# Altium footprint library Amin-Library.PcbLib: 601 footprints (part 1 of 38)
Each footprint in its own frame and in the unit in brackets; x right, y up, seen from the top. Pads: shape width x height; smd on the part's side, far side on the other; paste and mask are expansions set on the pad; w line width, h text height; cw(c..) or ccw(c..) is an arc to the next point about the centre after c.
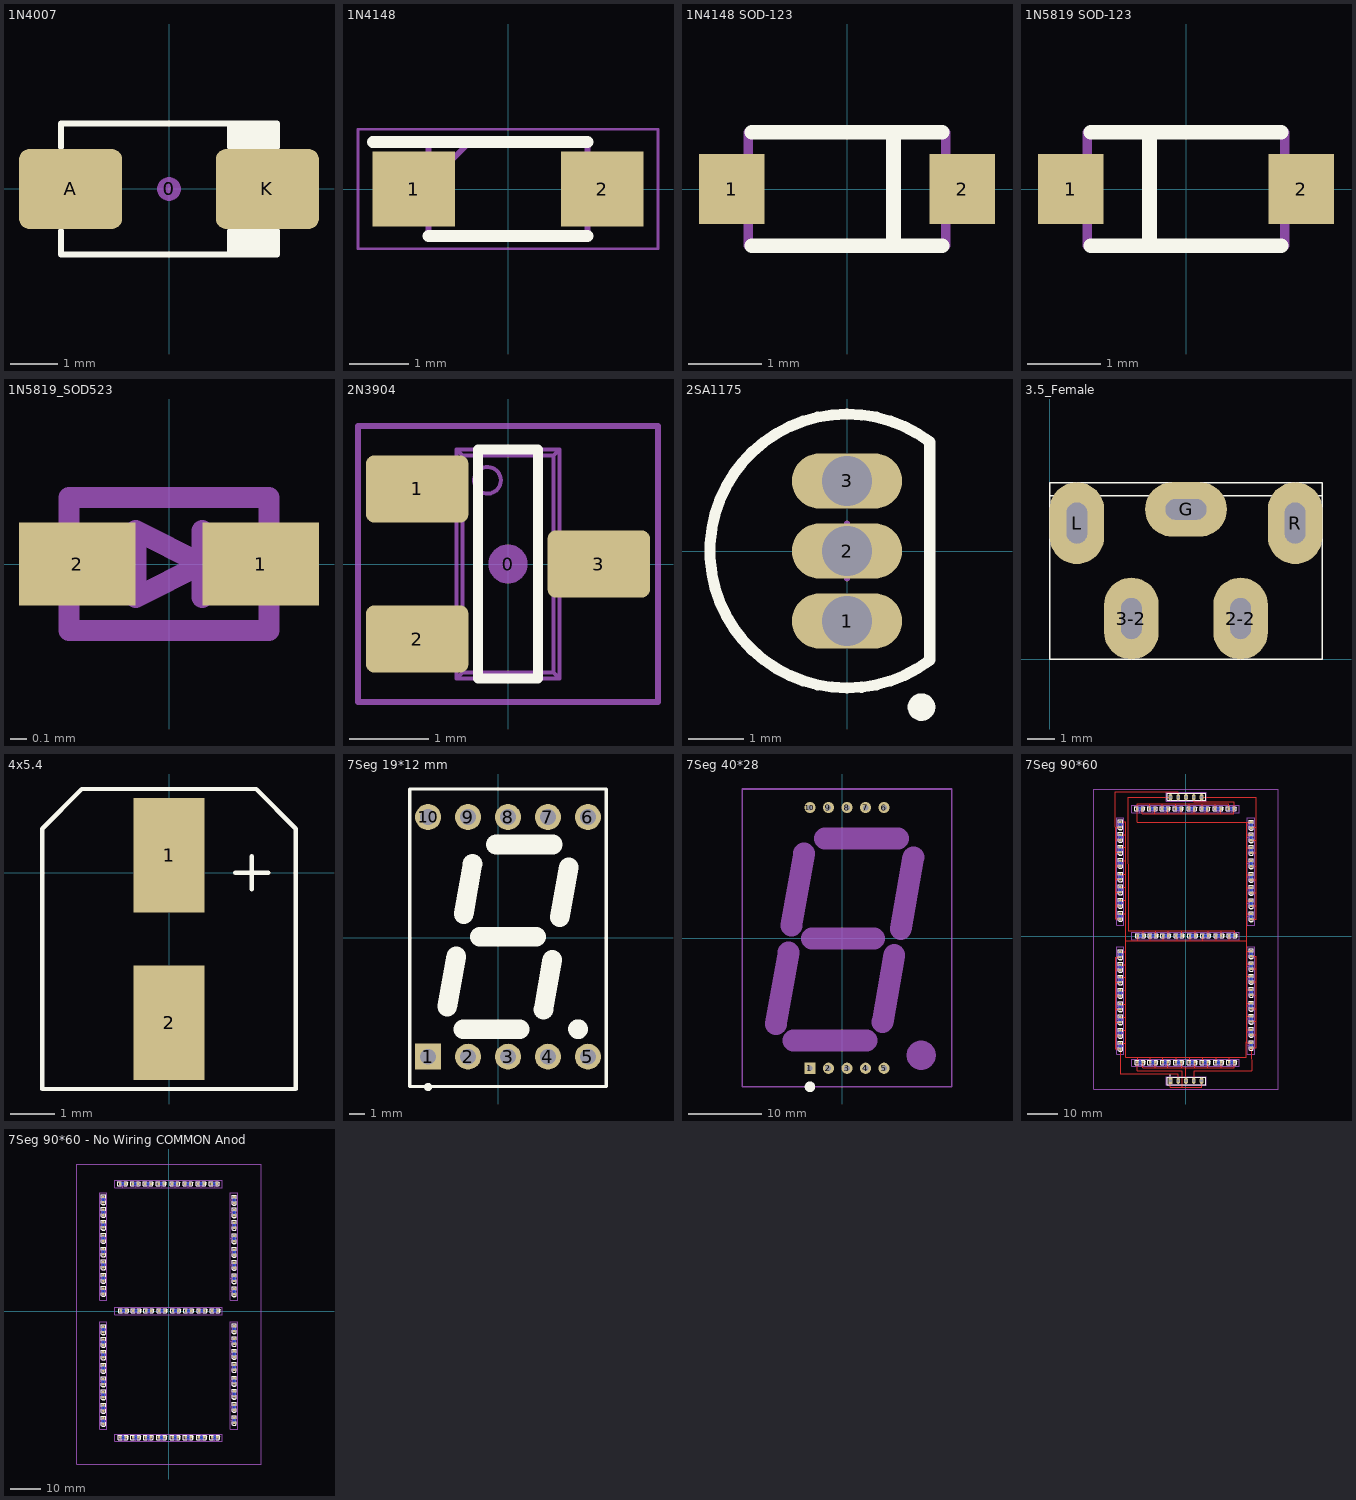
[diagram p0: the footprints below, top view; thin cyan lines are the x and y axes]

## 1N4007 [mm] "DO214 variation AC. SMA"
height 2.5
pads (3):
  round 0.508 on Mech15: 0(0,0)
  rrect25% 2.2x1.7 smd: A(-2.1,0) K(2.1,0)
Top Overlay:
  rectangle: 1.3,-1.4 2.3,-0.9
  rectangle: 1.3,0.9 2.3,1.4
  lines w0.127: -2.3,-0.9 -2.3,-1.4 2.3,-1.4 2.3,-0.9 1.3,-0.9 1.3,-1.4 ; -2.3,0.9 -2.3,1.4 2.3,1.4 2.3,0.9 1.3,0.9 ; 1.3,0.911 1.3,1.4
3D body "SW3dPS-DO-214AC SMA.STEP": height 2.42, standoff 0.02, extent -2.6,-1.3 2.6,1.3

## 1N4148 [mm]
pads (2):
  rect 1.4x1.27 smd: 1(-1.6,0) 2(1.6,0)
Top Overlay:
  lines w0.2: -2.3,0.8 1.35,0.8 ; -1.35,-0.8 1.35,-0.8
Mechanical 13:
  lines w0.1: -1.35,0.1 -0.65,0.8 ; -1.35,-0.8 1.35,-0.8 1.35,0.8 -1.35,0.8 -1.35,-0.8
Mechanical 15:
  lines w0.05: -2.55,-1.016 2.55,-1.016 2.55,1.016 -2.55,1.016 -2.55,-1.016
3D body "1n4148ws-7-f.stp": height 1.06, standoff -0.04, extent -1.25,-0.635 1.25,0.665

## 1N4148 SOD-123 [mm]
pads (2):
  rect 0.9x0.95 smd: 1(-1.575,0) 2(1.575,0)
Top Overlay:
  lines w0.203: -1.3,-0.775 0.635,-0.775 0.635,0.775 -1.3,0.775 ; -0.5,-0.775 1.3,-0.775 ; -0.5,0.775 1.3,0.775
Mechanical 13:
  lines w0.127: -1.35,-0.775 -1.35,0.775 1.35,0.775 1.35,-0.775 -1.35,-0.775
3D body "CircuitWorks-SOD123.step": height 1.28, standoff 0.01, extent -1.85,-0.8 1.85,0.8

## 1N5819 SOD-123 [mm]
pads (2):
  rect 0.9x0.95 smd: 1(-1.575,0) 2(1.575,0)
Top Overlay:
  lines w0.203: -1.3,-0.775 -0.5,-0.775 ; -1.3,0.775 -0.5,0.775 ; 1.3,-0.775 -0.5,-0.775 ; 1.3,0.775 -0.5,0.775 ; -0.5,-0.775 -0.5,0.775
Mechanical 13:
  lines w0.127: -1.35,-0.775 -1.35,0.775 1.35,0.775 1.35,-0.775 -1.35,-0.775
3D body "CircuitWorks-SOD123.step": height 1.28, standoff 0.01, extent -1.85,-0.8 1.85,0.8

## 1N5819_SOD523 [mm]
pads (2):
  rect 0.7x0.5 smd: 1(0.55,0) 2(-0.55,0)
Mechanical 13:
  region: -0.6,-0.15 -0.801,-0.15 -0.801,0.15 -0.6,0.15
  region: 0.8,-0.15 0.6,-0.15 0.6,0.15 0.8,0.15
  lines w0.127: 0.2,-0.2 0.2,0 ; 0.2,0.2 0.2,0 ; 0.2,0 -0.2,-0.2 -0.2,0.2 0.2,0 ; -0.6,-0.4 -0.6,0.4 0.6,0.4 0.6,-0.4 -0.6,-0.4
3D body "User Library-SOD-523F.step": height 0.71, standoff 0.01, extent -0.8,-0.399 0.8,0.399

## 2N3904 [mm] "BJT TRANSISTOR SOT23, 3 pin"
height 1.003
pads (4):
  round 0.5 on Mech15: 0(0,0)
  rrect25% 1.3x0.85 smd: 1(-1.15,0.95) 2(-1.15,-0.95) 3(1.15,0)
Top Overlay:
  lines w0.127: -0.381,-1.45 0.381,-1.45 0.381,1.45 -0.381,1.45 -0.381,-1.45
  text "." at -2.125,0.95 h1.4
Mechanical 13:
  circle w0.05: c-0.26,1.06 r0.169
  lines w0.05: -1.19,-1.19 -1.19,-0.71 ; -1.19,0.71 -1.19,1.19 ; -1.099,-1.19 -1.099,-0.71 ; -1.099,0.71 -1.099,1.19 ; -1.074,-1.19 -1.074,-0.71 ; -1.074,0.71 -1.074,1.19 ; -0.825,-1.19 -0.825,-0.71 ; -0.825,0.71 -0.825,1.19 ; -0.65,-1.19 -1.4,-1.19 -1.4,-0.71 -0.65,-0.71 ; -0.65,0.71 -1.4,0.71 -1.4,1.19 -0.65,1.19 ; 0.65,-0.24 1.4,-0.24 1.4,0.24 0.65,0.24 ; 0.825,-0.24 0.825,0.24 ; 1.074,-0.24 1.074,0.24 ; 1.099,-0.24 1.099,0.24 ; 1.19,-0.24 1.19,0.24 ; -0.65,-1.45 -0.576,-1.376 ; -0.65,-1.45 -0.65,1.45 ; -0.65,-1.45 0.65,-1.45 ; -0.65,1.45 0.65,1.45 ; -0.65,1.45 -0.576,1.376 ; -0.576,-1.376 -0.576,1.376 ; -0.576,-1.376 0.576,-1.376 ; -0.576,1.376 0.576,1.376 ; 0.576,-1.376 0.576,1.376 ; 0.576,-1.376 0.65,-1.45 ; 0.576,1.376 0.65,1.45 ; 0.65,-1.45 0.65,1.45
Mechanical 15:
  lines w0.076: -1.9,-1.75 1.9,-1.75 1.9,1.75 -1.9,1.75 -1.9,-1.75
3D body "SOT23-3.STEP": height 1.29, standoff -0.01, extent -1.4,-1.45 1.4,1.45

## 2SA1175 [mm] "TO, Flat Index; 3 In-Line, Axial Leads; Body Dia. 4.5mm; Leads 0.51 x 0.48 mm (max)"
height 6.86
pads (3):
  oval 2x1 hole 0.9: 1(0,-1.27) 2(0,0) 3(0,1.27)
Top Overlay:
  circle w0.25: c1.35,-2.83 r0.125
  lines w0.2: 1.5,-1.98 cw(c0,0) 1.5,1.98 1.5,-1.98
Mechanical 13:
  lines w0.1: 1.5,-1.98 cw(c0,0) 1.5,1.98 1.5,-1.98
Mechanical 15:
  lines w0.1: -0.5,0 0.5,0 ; 0,-0.5 0,0.5
3D body: height 6.86, standoff 2.2, extent -2.485,-2.495 1.501,2.495

## 3.5_Female [mm]
height 4.7
pads (5):
  oval 2x3 hole 0.762 slot 1.5 at 90 deg: 2-2(7,1.5) 3-2(3,1.5) L(1,5) R(9,5)
  oval 3x2 hole 0.762 slot 1.5 at 0 deg: G(5,5.5)
Top Overlay:
  lines w0.05: 0,5.969 0,6.477 10,6.477 10,6 ; 10,6 0,6 0,0 10,0 10,6
3D body: height 16, standoff 12, extent 2,0 8,6
3D body: height 12, standoff 0, extent 0,0 10.033,6.477

## 4x5.4 [mm]
pads (2):
  rect 1.6x2.6 smd: 1(0,0.4) 2(0,-3.4)
Top Overlay:
  lines w0.1: 1.5,0 2.25,0 ; 1.875,-0.375 1.875,0.375 ; -2.875,-4.9 -2.875,1 -1.975,1.9 1.975,1.9 2.875,1 2.875,-4.9 -2.875,-4.9
3D body "4x5.4.step": height 5.41, standoff -0.01, extent -2.65,-4.45 2.65,1.45

## 7Seg 19*12 mm [mm] "19*12 mm"
pads (10):
  rect 1.65x1.65 hole 1: 1(-4.472,-7.559)
  round 1.65 hole 1: 2(-1.932,-7.559) 3(0.608,-7.559) 4(3.148,-7.559) 5(5.688,-7.559) 6(5.688,7.681) 7(3.148,7.681) 8(0.608,7.681) 9(-1.932,7.681) 10(-4.472,7.681)
Top Overlay:
  circle w0.25: c-4.472,-9.49 r0.125
  circle w0.85: c5.063,-5.811 r0.2
  lines w0.2: -5.642,-9.461 -5.642,9.461 6.858,9.461 6.858,-9.461 -5.642,-9.461
  lines w1.25: -3.249,-4.366 -2.687,-1.191 ; -2.232,-5.814 1.364,-5.814 ; -2.21,1.509 -1.649,4.688 ; -1.194,0.061 2.41,0.061 ; -0.159,5.935 3.445,5.935 ; 2.868,-4.563 3.426,-1.389 ; 3.903,1.311 4.462,4.484
3D body "User Library-7-Segment.step": height 8, standoff -6.3, extent -5.692,-9.44 6.908,9.56

## 7Seg 40*28 [mil]
pads (10):
  rect 60x60 hole 30: 1(-175,-700)
  round 60 hole 30: 2(-75,-700) 3(25,-700) 4(125,-700) 5(225,-700) 6(225,706) 7(125,706) 8(25,706) 9(-75,706) 10(-175,706)
Top Overlay:
  circle w32.68: c-175,-800 r11.81
Mechanical 27:
  circle w78.74: c425,-630 r39.37
  lines w10: -539.96,-800 -539.96,806 589.96,806 589.96,-800 -539.96,-800
  lines w118.11: -358.6,-462.68 -290,-75 ; -275,70 -206.56,457.71 ; -263.7,-550 130,-550 ; -163.2,0 170,0 ; -93.7,540 300,540 ; 216.72,-449.96 280,-90 ; 315,50 383.29,437.73
3D body "7 segment 28.8 X 40.7.stp": height 358.27, standoff -222.44, extent -543.9,-800 589.96,802.36

## 7Seg 90*60 [mm]
pads (178):
  round 0.254 on Mech15: 0(-22.352,-35.814) 0(-22.352,-22.985) 0(-22.352,-18.542) 0(-22.352,-6) 0(-22.352,6.477) 0(-22.352,19.306) 0(-22.352,23.749) 0(-22.352,36.291) 0(-22.352,-10.104) 0(-22.352,32.187) 0(-22.352,-14.224) 0(-22.352,28.067) 0(-22.351,-27.209) 0(-22.351,15.082) 0(-22.351,-31.527) 0(-22.351,10.764) 0(-15.082,40.386) 0(-14.955,-42.164) 0(-14.828,-0.889) 0(-10.978,40.386) 0(-10.851,-42.164) 0(-10.724,-0.889) 0(-6.858,40.386) 0(-6.731,-42.164) 0(-6.604,-0.889) 0(-2.54,40.386) 0(-2.413,-42.164) 0(-2.286,-0.889) 0(1.903,40.386) 0(2.03,-42.164) 0(2.157,-0.889) 0(6.127,40.386) 0(6.254,-42.163) 0(6.381,-0.888) 0(10.445,40.387) 0(10.572,-42.163) 0(10.699,-0.888) 0(14.732,40.386) 0(14.859,-42.164) 0(14.986,-0.889) 0(20.193,-35.56) 0(20.193,-22.731) 0(20.193,-18.288) 0(20.193,-5.746) 0(20.193,6.35) 0(20.193,19.179) 0(20.193,23.622) 0(20.193,36.164) 0(20.193,-9.85) 0(20.193,32.06) 0(20.193,-13.97) 0(20.193,27.94) 0(20.194,-26.955) 0(20.194,14.955) 0(20.194,-31.273) 0(20.194,10.637)
  rect 1.24x2 hole 0.89: 1(-5.08,-47.117)
  rrect25% 0.8x0.8 smd: 2(-21.336,-36.664) 2(-21.336,-23.835) 2(-21.336,-19.392) 2(-21.336,-6.85) 2(-21.336,-10.954) 2(-21.336,-15.074) 2(-21.335,-28.059) 2(-21.335,-32.377) 3(-14.105,-41.148) 3(-10.001,-41.148) 3(-5.881,-41.148) 3(-1.563,-41.148) 3(2.88,-41.148) 3(7.104,-41.147) 3(11.422,-41.147) 3(15.709,-41.148) 4(21.209,-36.41) 4(21.209,-23.581) 4(21.209,-19.138) 4(21.209,-6.596) 4(21.209,-10.7) 4(21.209,-14.82) 4(21.21,-27.805) 4(21.21,-32.123) 5(-21.336,-34.964) 5(-21.336,-22.135) 5(-21.336,-17.692) 5(-21.336,-5.15) 5(-21.336,7.327) 5(-21.336,20.156) 5(-21.336,24.599) 5(-21.336,37.141) 5(-21.336,-9.254) 5(-21.336,33.037) 5(-21.336,-13.374) 5(-21.336,28.917) 5(-21.335,-26.359) 5(-21.335,15.932) 5(-21.335,-30.677) 5(-21.335,11.614) 5(-15.932,41.402) 5(-15.805,-41.148) 5(-15.678,0.127) 5(-11.828,41.402) 5(-11.701,-41.148) 5(-11.574,0.127) 5(-7.708,41.402) 5(-7.581,-41.148) 5(-7.454,0.127) 5(-3.39,41.402) 5(-3.263,-41.148) 5(-3.136,0.127) 5(1.053,41.402) 5(1.18,-41.148) 5(1.307,0.127) 5(5.277,41.402) 5(5.404,-41.147) 5(5.531,0.128) 5(9.595,41.403) 5(9.722,-41.147) 5(9.849,0.128) 5(13.882,41.402) 5(14.009,-41.148) 5(14.136,0.127) 5(21.209,-34.71) 5(21.209,-21.881) 5(21.209,-17.438) 5(21.209,-4.896) 5(21.209,7.2) 5(21.209,20.029) 5(21.209,24.472) 5(21.209,37.014) 5(21.209,-9) 5(21.209,32.91) 5(21.209,-13.12) 5(21.209,28.79) 5(21.21,-26.105) 5(21.21,15.805) 5(21.21,-30.423) 5(21.21,11.487) 6(21.209,5.5) 6(21.209,18.329) 6(21.209,22.772) 6(21.209,35.314) 6(21.209,31.21) 6(21.209,27.09) 6(21.21,14.105) 6(21.21,9.787) 7(-14.232,41.402) 7(-10.128,41.402) 7(-6.008,41.402) 7(-1.69,41.402) 7(2.753,41.402) 7(6.977,41.402) 7(11.295,41.403) 7(15.582,41.402) 9(-21.336,5.627) 9(-21.336,18.456) 9(-21.336,22.899) 9(-21.336,35.441) 9(-21.336,31.337) 9(-21.336,27.217) 9(-21.335,14.232) 9(-21.335,9.914) 10(-13.978,0.127) 10(-9.874,0.127) 10(-5.754,0.127) 10(-1.436,0.127) 10(3.007,0.127) 10(7.231,0.128) 10(11.549,0.128) 10(15.836,0.127)
  oval 1.24x2 hole 0.89: 2(-2.54,-47.117) 3(0,-47.117) 4(2.54,-47.117) 5(5.08,-47.117) 6(5.08,45.212) 7(2.54,45.212) 8(0,45.212) 9(-2.54,45.212) 10(-5.08,45.212)
Top Layer:
  lines w0.254: -22.987,-32.377 -21.336,-32.377 ; -22.987,-28.059 -21.336,-28.059 ; -22.987,-23.835 -21.336,-23.835 ; -22.987,-19.442 -21.336,-19.392 ; -22.987,-15.074 -21.336,-15.074 ; -22.987,-10.954 -21.336,-10.954 ; -22.987,9.914 -21.336,9.914 ; -22.987,14.232 -21.336,14.232 ; -22.987,18.456 -21.336,18.456 ; -22.987,22.849 -21.336,22.899 ; -22.987,27.217 -21.336,27.217 ; -22.987,31.337 -21.336,31.337 ; -21.336,-36.664 -22.987,-36.664 -22.987,-6.85 -21.336,-6.85 ; -21.336,-36.614 -21.335,-44.831 -2.54,-44.831 -2.54,-47.117 ; -21.336,-34.964 -19.685,-34.964 ; -21.335,-26.359 -19.685,-26.359 ; -21.336,-22.135 -19.685,-22.135 ; -21.336,-17.692 -19.685,-17.742 ; -21.336,-13.374 -19.685,-13.374 ; -21.336,-9.254 -19.685,-9.254 ; -21.336,5.627 -22.987,5.627 -22.987,35.441 ; -21.336,7.327 -19.685,7.327 ; -21.335,15.932 -19.685,15.932 ; -21.336,20.156 -19.685,20.156 ; -21.336,24.599 -19.685,24.549 ; -21.336,28.917 -19.685,28.917 ; -21.336,33.037 -19.685,33.037 ; -21.336,35.441 -22.987,35.441 ; -21.336,37.141 -19.685,37.141 -19.685,7.327 ; -21.335,-30.677 -19.685,-30.677 ; -21.335,11.614 -19.685,11.614 ; -21.025,-5.15 -21.336,-5.15 -19.685,-5.15 -19.685,-34.964 ; -19.685,-5.401 -19.685,7.327 ; -19.685,-1.524 -15.678,-1.524 ; -15.932,37.014 -15.932,41.402 -15.932,43.053 13.882,43.053 13.882,41.402 ; -15.882,37.014 19.558,37.014 ; -15.805,-41.148 -15.805,-43.815 -1.27,-43.815 -1.27,-49.276 ; -15.755,-41.148 -15.755,-39.497 ; -15.678,0.127 -15.678,-1.524 ; -14.232,41.402 -14.232,39.751 15.582,39.751 15.582,41.402 ; -14.105,-41.148 -14.105,-42.799 15.709,-42.799 15.709,-41.148 ; -13.978,0.127 -13.978,1.778 ; -11.828,41.402 -11.828,43.053 ; -11.651,-41.148 -11.651,-39.497 ; -11.574,-1.524 -11.574,0.127 ; -10.128,39.751 -10.128,41.402 ; -10.001,-42.799 -10.001,-41.148 ; -9.874,0.127 -9.874,1.778 ; -7.708,41.402 -7.708,43.053 ; -7.531,-41.148 -7.531,-39.497 ; -7.454,-1.524 -7.454,0.127 ; -6.008,39.751 -6.008,41.402 ; -5.881,-42.799 -5.881,-41.148 ; -5.754,0.127 -5.754,1.778 ; -5.08,-47.117 -5.107,-49.276 -1.513,-49.276 5.08,-49.276 5.08,-47.117 ; -5.08,45.212 -18.923,45.212 -18.796,1.778 -13.978,1.778 ; -3.39,41.402 -3.34,43.053 ; -3.213,-41.148 -3.163,-39.497 ; -3.136,0.127 -3.086,-1.524 ; -2.54,45.212 -2.54,46.99 -22.987,46.99 -22.987,35.441 ; -1.69,41.402 -1.64,39.751 ; -1.563,-41.148 -1.513,-42.799 ; -1.436,0.127 -1.386,1.778 ; 0,-47.117 0,-42.799 ; 1.053,41.402 1.053,43.053 ; 1.23,-41.148 1.23,-39.497 ; 1.307,-1.524 1.307,0.127 ; 2.54,-47.117 2.48,-43.815 21.336,-43.815 21.209,-36.41 22.86,-36.41 22.86,-6.596 21.209,-6.596 ; 2.54,45.212 2.54,43.688 15.532,43.688 15.532,41.402 ; 2.753,39.751 2.753,41.402 ; 2.88,-42.799 2.88,-41.148 ; 3.007,0.127 3.007,1.778 ; 5.08,45.212 22.86,45.212 22.86,35.364 ; 5.277,41.402 5.277,43.053 ; 5.454,-41.148 5.454,-39.497 ; 5.531,-1.524 5.531,0.127 ; 6.977,39.751 6.977,41.402 ; 7.104,-42.799 7.104,-41.148 ; 7.231,0.128 7.231,1.778 ; 9.595,41.403 9.595,43.053 ; 9.772,-41.147 9.772,-39.497 ; 9.849,-1.524 9.849,0.127 ; 11.295,39.751 11.295,41.401 ; 11.422,-42.799 11.422,-41.148 ; 11.549,0.128 11.549,1.778 ; 13.309,-39.497 19.558,-39.497 19.558,-34.417 ; 14.059,-41.148 14.059,-39.497 -15.755,-39.497 ; 14.136,0.127 14.136,-1.524 ; 15.836,0.127 15.836,1.778 -13.978,1.778 ; 19.558,-30.423 21.209,-30.423 ; 19.558,-26.105 21.209,-26.105 ; 19.558,-21.881 21.209,-21.881 ; 19.558,-17.488 21.209,-17.438 ; 19.558,-13.12 21.209,-13.12 ; 19.558,-9 21.209,-9 ; 19.558,-5.246 19.558,7.493 ; 19.558,-1.524 14.136,-1.524 ; 19.558,11.487 21.209,11.487 ; 19.558,15.805 21.209,15.805 ; 19.558,20.029 21.209,20.029 ; 19.558,24.422 21.209,24.472 ; 19.558,28.79 21.209,28.79 ; 19.558,32.91 21.209,32.91 ; 21.209,-34.71 19.558,-34.71 19.558,-4.896 21.209,-4.896 ; 21.21,-27.805 22.86,-27.805 ; 21.209,-23.581 22.86,-23.581 ; 21.209,-19.138 22.86,-19.188 ; 21.209,-14.82 22.86,-14.82 ; 21.209,-10.7 22.86,-10.7 ; 21.209,5.55 22.86,5.55 22.86,35.364 ; 21.209,7.2 19.558,7.2 19.558,37.014 ; 21.21,14.155 22.86,14.155 ; 21.209,18.379 22.86,18.379 ; 21.209,22.822 22.86,22.772 ; 21.209,27.14 22.86,27.14 ; 21.209,31.26 22.86,31.26 ; 21.209,35.364 22.86,35.364 ; 21.209,37.014 19.558,37.014 ; 21.21,-32.123 22.86,-32.123 ; 21.21,9.837 22.86,9.837 ; -19.685,-34.964 -19.685,-39.497 -15.755,-39.497 ; -15.678,-1.524 14.136,-1.524
Bottom Layer:
  pour cut-out: -15.582,40.902 -14.582,40.902 -14.582,41.902 -15.582,41.902
  pour cut-out: -11.478,40.902 -10.478,40.902 -10.478,41.902 -11.478,41.902
  pour cut-out: -7.358,40.902 -6.358,40.902 -6.358,41.902 -7.358,41.902
  pour cut-out: -3.04,40.902 -2.04,40.902 -2.04,41.902 -3.04,41.902
  pour cut-out: 1.403,40.902 2.403,40.902 2.403,41.902 1.403,41.902
  pour cut-out: 5.627,40.902 6.627,40.902 6.627,41.902 5.627,41.902
  pour cut-out: 9.945,40.903 10.945,40.903 10.945,41.903 9.945,41.903
  pour cut-out: 14.232,40.902 15.232,40.902 15.232,41.902 14.232,41.902
  pour cut-out: -21.836,36.791 -21.836,35.791 -20.836,35.791 -20.836,36.791
  pour cut-out: -21.836,32.687 -21.836,31.687 -20.836,31.687 -20.836,32.687
  pour cut-out: -21.836,28.567 -21.836,27.567 -20.836,27.567 -20.836,28.567
  pour cut-out: -21.836,24.249 -21.836,23.249 -20.836,23.249 -20.836,24.249
  pour cut-out: -21.836,19.806 -21.836,18.806 -20.836,18.806 -20.836,19.806
  pour cut-out: -21.835,15.582 -21.835,14.582 -20.835,14.582 -20.835,15.582
  pour cut-out: -21.835,11.264 -21.835,10.264 -20.835,10.264 -20.835,11.264
  pour cut-out: -21.836,6.977 -21.836,5.977 -20.836,5.977 -20.836,6.977
  pour cut-out: 20.709,36.664 20.709,35.664 21.709,35.664 21.709,36.664
  pour cut-out: 20.709,32.56 20.709,31.56 21.709,31.56 21.709,32.56
  pour cut-out: 20.709,28.44 20.709,27.44 21.709,27.44 21.709,28.44
  pour cut-out: 20.709,24.122 20.709,23.122 21.709,23.122 21.709,24.122
  pour cut-out: 20.709,19.679 20.709,18.679 21.709,18.679 21.709,19.679
  pour cut-out: 20.71,15.455 20.71,14.455 21.71,14.455 21.71,15.455
  pour cut-out: 20.71,11.137 20.71,10.137 21.71,10.137 21.71,11.137
  pour cut-out: 20.709,6.85 20.709,5.85 21.709,5.85 21.709,6.85
  pour cut-out: -15.328,-0.373 -14.328,-0.373 -14.328,0.627 -15.328,0.627
  pour cut-out: -11.224,-0.373 -10.224,-0.373 -10.224,0.627 -11.224,0.627
  pour cut-out: -7.104,-0.373 -6.104,-0.373 -6.104,0.627 -7.104,0.627
  pour cut-out: -2.786,-0.373 -1.786,-0.373 -1.786,0.627 -2.786,0.627
  pour cut-out: 1.657,-0.373 2.657,-0.373 2.657,0.627 1.657,0.627
  pour cut-out: 5.881,-0.372 6.881,-0.372 6.881,0.628 5.881,0.628
  pour cut-out: 10.199,-0.372 11.199,-0.372 11.199,0.628 10.199,0.628
  pour cut-out: 14.486,-0.373 15.486,-0.373 15.486,0.627 14.486,0.627
  pour cut-out: 20.709,-5.246 20.709,-6.246 21.709,-6.246 21.709,-5.246
  pour cut-out: 20.709,-9.35 20.709,-10.35 21.709,-10.35 21.709,-9.35
  pour cut-out: 20.709,-13.47 20.709,-14.47 21.709,-14.47 21.709,-13.47
  pour cut-out: 20.709,-17.788 20.709,-18.788 21.709,-18.788 21.709,-17.788
  pour cut-out: 20.709,-22.231 20.709,-23.231 21.709,-23.231 21.709,-22.231
  pour cut-out: 20.71,-26.455 20.71,-27.455 21.71,-27.455 21.71,-26.455
  pour cut-out: 20.71,-30.773 20.71,-31.773 21.71,-31.773 21.71,-30.773
  pour cut-out: 20.709,-35.06 20.709,-36.06 21.709,-36.06 21.709,-35.06
  pour cut-out: -21.836,-5.5 -21.836,-6.5 -20.836,-6.5 -20.836,-5.5
  pour cut-out: -21.836,-9.604 -21.836,-10.604 -20.836,-10.604 -20.836,-9.604
  pour cut-out: -21.836,-13.724 -21.836,-14.724 -20.836,-14.724 -20.836,-13.724
  pour cut-out: -21.836,-18.042 -21.836,-19.042 -20.836,-19.042 -20.836,-18.042
  pour cut-out: -21.836,-22.485 -21.836,-23.485 -20.836,-23.485 -20.836,-22.485
  pour cut-out: -21.835,-26.709 -21.835,-27.709 -20.835,-27.709 -20.835,-26.709
  pour cut-out: -21.835,-31.027 -21.835,-32.027 -20.835,-32.027 -20.835,-31.027
  pour cut-out: -21.836,-35.314 -21.836,-36.314 -20.836,-36.314 -20.836,-35.314
  pour cut-out: -15.455,-41.648 -14.455,-41.648 -14.455,-40.648 -15.455,-40.648
  pour cut-out: -11.351,-41.648 -10.351,-41.648 -10.351,-40.648 -11.351,-40.648
  pour cut-out: -7.231,-41.648 -6.231,-41.648 -6.231,-40.648 -7.231,-40.648
  pour cut-out: -2.913,-41.648 -1.913,-41.648 -1.913,-40.648 -2.913,-40.648
  pour cut-out: 1.53,-41.648 2.53,-41.648 2.53,-40.648 1.53,-40.648
  pour cut-out: 5.754,-41.647 6.754,-41.647 6.754,-40.647 5.754,-40.647
  pour cut-out: 10.072,-41.647 11.072,-41.647 11.072,-40.647 10.072,-40.647
  pour cut-out: 14.359,-41.648 15.359,-41.648 15.359,-40.648 14.359,-40.648
Top Overlay:
  drawing of 625 lines, arcs and shapes, not listed
Mechanical 1:
  lines w0.4: -22.601,-38.43 -20.201,-38.43 -20.201,-3.43 -22.601,-3.43 -22.601,-38.43 ; -22.601,3.57 -20.201,3.57 -20.201,38.57 -22.601,38.57 -22.601,3.57 ; -17.601,-42.43 17.399,-42.43 17.399,-40.03 -17.601,-40.03 -17.601,-42.43 ; -17.601,-1.13 17.399,-1.13 17.399,1.27 -17.601,1.27 -17.601,-1.13 ; -17.601,40.17 17.399,40.17 17.399,42.57 -17.601,42.57 -17.601,40.17 ; 19.999,-38.43 19.999,-3.43 22.399,-3.43 22.399,-38.43 19.999,-38.43 ; 19.999,3.57 22.399,3.57 22.399,38.57 19.999,38.57 19.999,3.57
Mechanical 4:
  circle w0.2: c-5.207,-45.376 r0.1
  circle w0.2: c-5.207,-45.376 r0.1
  lines w0.127: -6.15,-48.324 -6.15,-45.984 ; -6.15,-48.324 6.35,-48.324 ; -6.15,-48.324 6.35,-48.324 ; -6.15,-48.324 -6.15,-45.984 ; -6.15,-48.324 6.35,-48.324 ; -6.15,-48.324 6.35,-48.324 ; -6.15,-45.984 6.35,-45.984 ; -6.15,-45.984 6.35,-45.984 ; -6.15,44.206 -6.15,46.546 ; -6.15,44.206 6.35,44.206 ; -6.15,44.206 6.35,44.206 ; -6.15,44.206 -6.15,46.546 ; -6.15,44.206 6.35,44.206 ; -6.15,44.206 6.35,44.206 ; -6.15,46.546 6.35,46.546 ; -6.15,46.546 6.35,46.546 ; 6.35,-48.324 6.35,-45.984 ; 6.35,-48.324 6.35,-45.984 ; 6.35,44.206 6.35,46.546 ; 6.35,44.206 6.35,46.546
Mechanical 13:
  drawing of 896 lines, arcs and shapes, not listed
Mechanical 15:
  drawing of 224 lines, arcs and shapes, not listed
Mechanical 16:
  lines w0.05: -6.4,-48.574 6.604,-48.574 6.604,-45.734 -6.4,-45.734 -6.4,-48.574 ; -6.4,43.956 6.604,43.956 6.604,46.796 -6.4,46.796 -6.4,43.956
Mechanical 27:
  lines w0.254: -30,-49.784 30,-49.784 30,47.879 -30,47.879 -30,-49.784
3D body "LED 0603 APT1608 BLUE.STEP": height 0.75, standoff 0, extent -15.882,41.002 -14.282,41.802
3D body "LED 0603 APT1608 BLUE.STEP": height 0.75, standoff 0, extent -11.778,41.002 -10.178,41.802
3D body "LED 0603 APT1608 BLUE.STEP": height 0.75, standoff 0, extent -7.658,41.002 -6.058,41.802
3D body "LED 0603 APT1608 BLUE.STEP": height 0.75, standoff 0, extent -3.34,41.002 -1.74,41.802
3D body "LED 0603 APT1608 BLUE.STEP": height 0.75, standoff 0, extent 1.103,41.002 2.703,41.802
3D body "LED 0603 APT1608 BLUE.STEP": height 0.75, standoff 0, extent 5.327,41.002 6.927,41.802
3D body "LED 0603 APT1608 BLUE.STEP": height 0.75, standoff 0, extent 9.645,41.003 11.245,41.803
3D body "LED 0603 APT1608 BLUE.STEP": height 0.75, standoff 0, extent 13.932,41.002 15.532,41.802
3D body "LED 0603 APT1608 BLUE.STEP": height 0.75, standoff 0, extent -21.736,35.491 -20.936,37.091
3D body "LED 0603 APT1608 BLUE.STEP": height 0.75, standoff 0, extent -21.736,31.387 -20.936,32.987
3D body "LED 0603 APT1608 BLUE.STEP": height 0.75, standoff 0, extent -21.736,27.267 -20.936,28.867
3D body "LED 0603 APT1608 BLUE.STEP": height 0.75, standoff 0, extent -21.736,22.949 -20.936,24.549
3D body "LED 0603 APT1608 BLUE.STEP": height 0.75, standoff 0, extent -21.736,18.506 -20.936,20.106
3D body "LED 0603 APT1608 BLUE.STEP": height 0.75, standoff 0, extent -21.736,14.282 -20.936,15.882
3D body "LED 0603 APT1608 BLUE.STEP": height 0.75, standoff 0, extent -21.735,9.964 -20.935,11.564
3D body "LED 0603 APT1608 BLUE.STEP": height 0.75, standoff 0, extent -21.736,5.677 -20.936,7.277
3D body "LED 0603 APT1608 BLUE.STEP": height 0.75, standoff 0, extent 20.809,35.364 21.609,36.964
3D body "LED 0603 APT1608 BLUE.STEP": height 0.75, standoff 0, extent 20.809,31.26 21.609,32.86
3D body "LED 0603 APT1608 BLUE.STEP": height 0.75, standoff 0, extent 20.809,27.14 21.609,28.74
3D body "LED 0603 APT1608 BLUE.STEP": height 0.75, standoff 0, extent 20.809,22.822 21.609,24.422
3D body "LED 0603 APT1608 BLUE.STEP": height 0.75, standoff 0, extent 20.809,18.379 21.609,19.979
3D body "LED 0603 APT1608 BLUE.STEP": height 0.75, standoff 0, extent 20.809,14.155 21.609,15.755
3D body "LED 0603 APT1608 BLUE.STEP": height 0.75, standoff 0, extent 20.81,9.837 21.61,11.437
3D body "LED 0603 APT1608 BLUE.STEP": height 0.75, standoff 0, extent 20.809,5.55 21.609,7.15
3D body "LED 0603 APT1608 BLUE.STEP": height 0.75, standoff 0, extent -15.628,-0.273 -14.028,0.527
3D body "LED 0603 APT1608 BLUE.STEP": height 0.75, standoff 0, extent -11.524,-0.273 -9.924,0.527
3D body "LED 0603 APT1608 BLUE.STEP": height 0.75, standoff 0, extent -7.404,-0.273 -5.804,0.527
3D body "LED 0603 APT1608 BLUE.STEP": height 0.75, standoff 0, extent -3.086,-0.273 -1.486,0.527
3D body "LED 0603 APT1608 BLUE.STEP": height 0.75, standoff 0, extent 1.357,-0.273 2.957,0.527
3D body "LED 0603 APT1608 BLUE.STEP": height 0.75, standoff 0, extent 5.581,-0.273 7.181,0.527
3D body "LED 0603 APT1608 BLUE.STEP": height 0.75, standoff 0, extent 9.899,-0.272 11.499,0.528
3D body "LED 0603 APT1608 BLUE.STEP": height 0.75, standoff 0, extent 14.186,-0.273 15.786,0.527
3D body "LED 0603 APT1608 BLUE.STEP": height 0.75, standoff 0, extent 20.809,-6.546 21.609,-4.946
3D body "LED 0603 APT1608 BLUE.STEP": height 0.75, standoff 0, extent 20.809,-10.65 21.609,-9.05
3D body "LED 0603 APT1608 BLUE.STEP": height 0.75, standoff 0, extent 20.809,-14.77 21.609,-13.17
3D body "LED 0603 APT1608 BLUE.STEP": height 0.75, standoff 0, extent 20.809,-19.088 21.609,-17.488
3D body "LED 0603 APT1608 BLUE.STEP": height 0.75, standoff 0, extent 20.809,-23.531 21.609,-21.931
3D body "LED 0603 APT1608 BLUE.STEP": height 0.75, standoff 0, extent 20.809,-27.755 21.609,-26.155
3D body "LED 0603 APT1608 BLUE.STEP": height 0.75, standoff 0, extent 20.81,-32.073 21.61,-30.473
3D body "LED 0603 APT1608 BLUE.STEP": height 0.75, standoff 0, extent 20.809,-36.36 21.609,-34.76
3D body "LED 0603 APT1608 BLUE.STEP": height 0.75, standoff 0, extent -21.736,-6.8 -20.936,-5.2
3D body "LED 0603 APT1608 BLUE.STEP": height 0.75, standoff 0, extent -21.736,-10.904 -20.936,-9.304
3D body "LED 0603 APT1608 BLUE.STEP": height 0.75, standoff 0, extent -21.736,-15.024 -20.936,-13.424
3D body "LED 0603 APT1608 BLUE.STEP": height 0.75, standoff 0, extent -21.736,-19.342 -20.936,-17.742
3D body "LED 0603 APT1608 BLUE.STEP": height 0.75, standoff 0, extent -21.736,-23.785 -20.936,-22.185
3D body "LED 0603 APT1608 BLUE.STEP": height 0.75, standoff 0, extent -21.736,-28.009 -20.936,-26.409
3D body "LED 0603 APT1608 BLUE.STEP": height 0.75, standoff 0, extent -21.735,-32.327 -20.935,-30.727
3D body "LED 0603 APT1608 BLUE.STEP": height 0.75, standoff 0, extent -21.736,-36.614 -20.936,-35.014
3D body "LED 0603 APT1608 BLUE.STEP": height 0.75, standoff 0, extent -15.755,-41.548 -14.155,-40.748
3D body "LED 0603 APT1608 BLUE.STEP": height 0.75, standoff 0, extent -11.651,-41.548 -10.051,-40.748
3D body "LED 0603 APT1608 BLUE.STEP": height 0.75, standoff 0, extent -7.531,-41.548 -5.931,-40.748
3D body "LED 0603 APT1608 BLUE.STEP": height 0.75, standoff 0, extent -3.213,-41.548 -1.613,-40.748
3D body "LED 0603 APT1608 BLUE.STEP": height 0.75, standoff 0, extent 1.23,-41.548 2.83,-40.748
3D body "LED 0603 APT1608 BLUE.STEP": height 0.75, standoff 0, extent 5.454,-41.548 7.054,-40.748
3D body "LED 0603 APT1608 BLUE.STEP": height 0.75, standoff 0, extent 9.772,-41.547 11.372,-40.747
3D body "LED 0603 APT1608 BLUE.STEP": height 0.75, standoff 0, extent 14.059,-41.548 15.659,-40.748

## 7Seg 90*60 - No Wiring COMMON Anod [mm]
pads (168):
  round 0.254 on Mech15: 0(-22.352,-35.814) 0(-22.352,-22.985) 0(-22.352,-18.542) 0(-22.352,-6) 0(-22.352,6.477) 0(-22.352,19.306) 0(-22.352,23.749) 0(-22.352,36.291) 0(-22.352,-10.104) 0(-22.352,32.187) 0(-22.352,-14.224) 0(-22.352,28.067) 0(-22.351,-27.209) 0(-22.351,15.082) 0(-22.351,-31.527) 0(-22.351,10.764) 0(-15.082,40.386) 0(-14.955,-42.164) 0(-14.828,-0.889) 0(-10.978,40.386) 0(-10.851,-42.164) 0(-10.724,-0.889) 0(-6.858,40.386) 0(-6.731,-42.164) 0(-6.604,-0.889) 0(-2.54,40.386) 0(-2.413,-42.164) 0(-2.286,-0.889) 0(1.903,40.386) 0(2.03,-42.164) 0(2.157,-0.889) 0(6.127,40.386) 0(6.254,-42.163) 0(6.381,-0.888) 0(10.445,40.387) 0(10.572,-42.163) 0(10.699,-0.888) 0(14.732,40.386) 0(14.859,-42.164) 0(14.986,-0.889) 0(20.193,-35.56) 0(20.193,-22.731) 0(20.193,-18.288) 0(20.193,-5.746) 0(20.193,6.35) 0(20.193,19.179) 0(20.193,23.622) 0(20.193,36.164) 0(20.193,-9.85) 0(20.193,32.06) 0(20.193,-13.97) 0(20.193,27.94) 0(20.194,-26.955) 0(20.194,14.955) 0(20.194,-31.273) 0(20.194,10.637)
  rrect25% 0.8x0.8 smd: 2(-21.336,-36.664) 2(-21.336,-23.835) 2(-21.336,-19.392) 2(-21.336,-6.85) 2(-21.336,-10.954) 2(-21.336,-15.074) 2(-21.335,-28.059) 2(-21.335,-32.377) 3(-14.105,-41.148) 3(-10.001,-41.148) 3(-5.881,-41.148) 3(-1.563,-41.148) 3(2.88,-41.148) 3(7.104,-41.147) 3(11.422,-41.147) 3(15.709,-41.148) 4(21.209,-36.41) 4(21.209,-23.581) 4(21.209,-19.138) 4(21.209,-6.596) 4(21.209,-10.7) 4(21.209,-14.82) 4(21.21,-27.805) 4(21.21,-32.123) 5(-21.336,-34.964) 5(-21.336,-22.135) 5(-21.336,-17.692) 5(-21.336,-5.15) 5(-21.336,7.327) 5(-21.336,20.156) 5(-21.336,24.599) 5(-21.336,37.141) 5(-21.336,-9.254) 5(-21.336,33.037) 5(-21.336,-13.374) 5(-21.336,28.917) 5(-21.335,-26.359) 5(-21.335,15.932) 5(-21.335,-30.677) 5(-21.335,11.614) 5(-15.932,41.402) 5(-15.805,-41.148) 5(-15.678,0.127) 5(-11.828,41.402) 5(-11.701,-41.148) 5(-11.574,0.127) 5(-7.708,41.402) 5(-7.581,-41.148) 5(-7.454,0.127) 5(-3.39,41.402) 5(-3.263,-41.148) 5(-3.136,0.127) 5(1.053,41.402) 5(1.18,-41.148) 5(1.307,0.127) 5(5.277,41.402) 5(5.404,-41.147) 5(5.531,0.128) 5(9.595,41.403) 5(9.722,-41.147) 5(9.849,0.128) 5(13.882,41.402) 5(14.009,-41.148) 5(14.136,0.127) 5(21.209,-34.71) 5(21.209,-21.881) 5(21.209,-17.438) 5(21.209,-4.896) 5(21.209,7.2) 5(21.209,20.029) 5(21.209,24.472) 5(21.209,37.014) 5(21.209,-9) 5(21.209,32.91) 5(21.209,-13.12) 5(21.209,28.79) 5(21.21,-26.105) 5(21.21,15.805) 5(21.21,-30.423) 5(21.21,11.487) 6(21.209,5.5) 6(21.209,18.329) 6(21.209,22.772) 6(21.209,35.314) 6(21.209,31.21) 6(21.209,27.09) 6(21.21,14.105) 6(21.21,9.787) 7(-14.232,41.402) 7(-10.128,41.402) 7(-6.008,41.402) 7(-1.69,41.402) 7(2.753,41.402) 7(6.977,41.402) 7(11.295,41.403) 7(15.582,41.402) 9(-21.336,5.627) 9(-21.336,18.456) 9(-21.336,22.899) 9(-21.336,35.441) 9(-21.336,31.337) 9(-21.336,27.217) 9(-21.335,14.232) 9(-21.335,9.914) 10(-13.978,0.127) 10(-9.874,0.127) 10(-5.754,0.127) 10(-1.436,0.127) 10(3.007,0.127) 10(7.231,0.128) 10(11.549,0.128) 10(15.836,0.127)
Bottom Layer:
  pour cut-out: 14.359,-41.648 15.359,-41.648 15.359,-40.648 14.359,-40.648
  pour cut-out: 10.072,-41.647 11.072,-41.647 11.072,-40.647 10.072,-40.647
  pour cut-out: 5.754,-41.647 6.754,-41.647 6.754,-40.647 5.754,-40.647
  pour cut-out: 1.53,-41.648 2.53,-41.648 2.53,-40.648 1.53,-40.648
  pour cut-out: -2.913,-41.648 -1.913,-41.648 -1.913,-40.648 -2.913,-40.648
  pour cut-out: -7.231,-41.648 -6.231,-41.648 -6.231,-40.648 -7.231,-40.648
  pour cut-out: -11.351,-41.648 -10.351,-41.648 -10.351,-40.648 -11.351,-40.648
  pour cut-out: -15.455,-41.648 -14.455,-41.648 -14.455,-40.648 -15.455,-40.648
  pour cut-out: -21.836,-35.314 -21.836,-36.314 -20.836,-36.314 -20.836,-35.314
  pour cut-out: -21.835,-31.027 -21.835,-32.027 -20.835,-32.027 -20.835,-31.027
  pour cut-out: -21.835,-26.709 -21.835,-27.709 -20.835,-27.709 -20.835,-26.709
  pour cut-out: -21.836,-22.485 -21.836,-23.485 -20.836,-23.485 -20.836,-22.485
  pour cut-out: -21.836,-18.042 -21.836,-19.042 -20.836,-19.042 -20.836,-18.042
  pour cut-out: -21.836,-13.724 -21.836,-14.724 -20.836,-14.724 -20.836,-13.724
  pour cut-out: -21.836,-9.604 -21.836,-10.604 -20.836,-10.604 -20.836,-9.604
  pour cut-out: -21.836,-5.5 -21.836,-6.5 -20.836,-6.5 -20.836,-5.5
  pour cut-out: 20.709,-35.06 20.709,-36.06 21.709,-36.06 21.709,-35.06
  pour cut-out: 20.71,-30.773 20.71,-31.773 21.71,-31.773 21.71,-30.773
  pour cut-out: 20.71,-26.455 20.71,-27.455 21.71,-27.455 21.71,-26.455
  pour cut-out: 20.709,-22.231 20.709,-23.231 21.709,-23.231 21.709,-22.231
  pour cut-out: 20.709,-17.788 20.709,-18.788 21.709,-18.788 21.709,-17.788
  pour cut-out: 20.709,-13.47 20.709,-14.47 21.709,-14.47 21.709,-13.47
  pour cut-out: 20.709,-9.35 20.709,-10.35 21.709,-10.35 21.709,-9.35
  pour cut-out: 20.709,-5.246 20.709,-6.246 21.709,-6.246 21.709,-5.246
  pour cut-out: 14.486,-0.373 15.486,-0.373 15.486,0.627 14.486,0.627
  pour cut-out: 10.199,-0.372 11.199,-0.372 11.199,0.628 10.199,0.628
  pour cut-out: 5.881,-0.372 6.881,-0.372 6.881,0.628 5.881,0.628
  pour cut-out: 1.657,-0.373 2.657,-0.373 2.657,0.627 1.657,0.627
  pour cut-out: -2.786,-0.373 -1.786,-0.373 -1.786,0.627 -2.786,0.627
  pour cut-out: -7.104,-0.373 -6.104,-0.373 -6.104,0.627 -7.104,0.627
  pour cut-out: -11.224,-0.373 -10.224,-0.373 -10.224,0.627 -11.224,0.627
  pour cut-out: -15.328,-0.373 -14.328,-0.373 -14.328,0.627 -15.328,0.627
  pour cut-out: 20.709,6.85 20.709,5.85 21.709,5.85 21.709,6.85
  pour cut-out: 20.71,11.137 20.71,10.137 21.71,10.137 21.71,11.137
  pour cut-out: 20.71,15.455 20.71,14.455 21.71,14.455 21.71,15.455
  pour cut-out: 20.709,19.679 20.709,18.679 21.709,18.679 21.709,19.679
  pour cut-out: 20.709,24.122 20.709,23.122 21.709,23.122 21.709,24.122
  pour cut-out: 20.709,28.44 20.709,27.44 21.709,27.44 21.709,28.44
  pour cut-out: 20.709,32.56 20.709,31.56 21.709,31.56 21.709,32.56
  pour cut-out: 20.709,36.664 20.709,35.664 21.709,35.664 21.709,36.664
  pour cut-out: -21.836,6.977 -21.836,5.977 -20.836,5.977 -20.836,6.977
  pour cut-out: -21.835,11.264 -21.835,10.264 -20.835,10.264 -20.835,11.264
  pour cut-out: -21.835,15.582 -21.835,14.582 -20.835,14.582 -20.835,15.582
  pour cut-out: -21.836,19.806 -21.836,18.806 -20.836,18.806 -20.836,19.806
  pour cut-out: -21.836,24.249 -21.836,23.249 -20.836,23.249 -20.836,24.249
  pour cut-out: -21.836,28.567 -21.836,27.567 -20.836,27.567 -20.836,28.567
  pour cut-out: -21.836,32.687 -21.836,31.687 -20.836,31.687 -20.836,32.687
  pour cut-out: -21.836,36.791 -21.836,35.791 -20.836,35.791 -20.836,36.791
  pour cut-out: 14.232,40.902 15.232,40.902 15.232,41.902 14.232,41.902
  pour cut-out: 9.945,40.903 10.945,40.903 10.945,41.903 9.945,41.903
  pour cut-out: 5.627,40.902 6.627,40.902 6.627,41.902 5.627,41.902
  pour cut-out: 1.403,40.902 2.403,40.902 2.403,41.902 1.403,41.902
  pour cut-out: -3.04,40.902 -2.04,40.902 -2.04,41.902 -3.04,41.902
  pour cut-out: -7.358,40.902 -6.358,40.902 -6.358,41.902 -7.358,41.902
  pour cut-out: -11.478,40.902 -10.478,40.902 -10.478,41.902 -11.478,41.902
  pour cut-out: -15.582,40.902 -14.582,40.902 -14.582,41.902 -15.582,41.902
Top Overlay:
  drawing of 616 lines, arcs and shapes, not listed
Mechanical 1:
  lines w0.4: -22.601,-38.43 -22.601,-3.43 -20.201,-3.43 -20.201,-38.43 -22.601,-38.43 ; -22.601,3.57 -22.601,38.57 -20.201,38.57 -20.201,3.57 -22.601,3.57 ; -17.601,-42.43 -17.601,-40.03 17.399,-40.03 17.399,-42.43 -17.601,-42.43 ; -17.601,-1.13 -17.601,1.27 17.399,1.27 17.399,-1.13 -17.601,-1.13 ; -17.601,40.17 -17.601,42.57 17.399,42.57 17.399,40.17 -17.601,40.17 ; 19.999,-38.43 22.399,-38.43 22.399,-3.43 19.999,-3.43 19.999,-38.43 ; 19.999,3.57 19.999,38.57 22.399,38.57 22.399,3.57 19.999,3.57
Mechanical 13:
  drawing of 896 lines, arcs and shapes, not listed
Mechanical 15:
  drawing of 224 lines, arcs and shapes, not listed
Mechanical 27:
  lines w0.254: -30,-49.784 -30,47.879 30,47.879 30,-49.784 -30,-49.784
3D body "LED 0603 APT1608 BLUE.STEP": height 0.75, standoff 0, extent 14.059,-41.548 15.659,-40.748
3D body "LED 0603 APT1608 BLUE.STEP": height 0.75, standoff 0, extent 9.772,-41.547 11.372,-40.747
3D body "LED 0603 APT1608 BLUE.STEP": height 0.75, standoff 0, extent 5.454,-41.548 7.054,-40.748
3D body "LED 0603 APT1608 BLUE.STEP": height 0.75, standoff 0, extent 1.23,-41.548 2.83,-40.748
3D body "LED 0603 APT1608 BLUE.STEP": height 0.75, standoff 0, extent -3.213,-41.548 -1.613,-40.748
3D body "LED 0603 APT1608 BLUE.STEP": height 0.75, standoff 0, extent -7.531,-41.548 -5.931,-40.748
3D body "LED 0603 APT1608 BLUE.STEP": height 0.75, standoff 0, extent -11.651,-41.548 -10.051,-40.748
3D body "LED 0603 APT1608 BLUE.STEP": height 0.75, standoff 0, extent -15.755,-41.548 -14.155,-40.748
3D body "LED 0603 APT1608 BLUE.STEP": height 0.75, standoff 0, extent -21.736,-36.614 -20.936,-35.014
3D body "LED 0603 APT1608 BLUE.STEP": height 0.75, standoff 0, extent -21.735,-32.327 -20.935,-30.727
3D body "LED 0603 APT1608 BLUE.STEP": height 0.75, standoff 0, extent -21.736,-28.009 -20.936,-26.409
3D body "LED 0603 APT1608 BLUE.STEP": height 0.75, standoff 0, extent -21.736,-23.785 -20.936,-22.185
3D body "LED 0603 APT1608 BLUE.STEP": height 0.75, standoff 0, extent -21.736,-19.342 -20.936,-17.742
3D body "LED 0603 APT1608 BLUE.STEP": height 0.75, standoff 0, extent -21.736,-15.024 -20.936,-13.424
3D body "LED 0603 APT1608 BLUE.STEP": height 0.75, standoff 0, extent -21.736,-10.904 -20.936,-9.304
3D body "LED 0603 APT1608 BLUE.STEP": height 0.75, standoff 0, extent -21.736,-6.8 -20.936,-5.2
3D body "LED 0603 APT1608 BLUE.STEP": height 0.75, standoff 0, extent 20.809,-36.36 21.609,-34.76
3D body "LED 0603 APT1608 BLUE.STEP": height 0.75, standoff 0, extent 20.81,-32.073 21.61,-30.473
3D body "LED 0603 APT1608 BLUE.STEP": height 0.75, standoff 0, extent 20.809,-27.755 21.609,-26.155
3D body "LED 0603 APT1608 BLUE.STEP": height 0.75, standoff 0, extent 20.809,-23.531 21.609,-21.931
3D body "LED 0603 APT1608 BLUE.STEP": height 0.75, standoff 0, extent 20.809,-19.088 21.609,-17.488
3D body "LED 0603 APT1608 BLUE.STEP": height 0.75, standoff 0, extent 20.809,-14.77 21.609,-13.17
3D body "LED 0603 APT1608 BLUE.STEP": height 0.75, standoff 0, extent 20.809,-10.65 21.609,-9.05
3D body "LED 0603 APT1608 BLUE.STEP": height 0.75, standoff 0, extent 20.809,-6.546 21.609,-4.946
3D body "LED 0603 APT1608 BLUE.STEP": height 0.75, standoff 0, extent 14.186,-0.273 15.786,0.527
3D body "LED 0603 APT1608 BLUE.STEP": height 0.75, standoff 0, extent 9.899,-0.272 11.499,0.528
3D body "LED 0603 APT1608 BLUE.STEP": height 0.75, standoff 0, extent 5.581,-0.273 7.181,0.527
3D body "LED 0603 APT1608 BLUE.STEP": height 0.75, standoff 0, extent 1.357,-0.273 2.957,0.527
3D body "LED 0603 APT1608 BLUE.STEP": height 0.75, standoff 0, extent -3.086,-0.273 -1.486,0.527
3D body "LED 0603 APT1608 BLUE.STEP": height 0.75, standoff 0, extent -7.404,-0.273 -5.804,0.527
3D body "LED 0603 APT1608 BLUE.STEP": height 0.75, standoff 0, extent -11.524,-0.273 -9.924,0.527
3D body "LED 0603 APT1608 BLUE.STEP": height 0.75, standoff 0, extent -15.628,-0.273 -14.028,0.527
3D body "LED 0603 APT1608 BLUE.STEP": height 0.75, standoff 0, extent 20.809,5.55 21.609,7.15
3D body "LED 0603 APT1608 BLUE.STEP": height 0.75, standoff 0, extent 20.81,9.837 21.61,11.437
3D body "LED 0603 APT1608 BLUE.STEP": height 0.75, standoff 0, extent 20.809,14.155 21.609,15.755
3D body "LED 0603 APT1608 BLUE.STEP": height 0.75, standoff 0, extent 20.809,18.379 21.609,19.979
3D body "LED 0603 APT1608 BLUE.STEP": height 0.75, standoff 0, extent 20.809,22.822 21.609,24.422
3D body "LED 0603 APT1608 BLUE.STEP": height 0.75, standoff 0, extent 20.809,27.14 21.609,28.74
3D body "LED 0603 APT1608 BLUE.STEP": height 0.75, standoff 0, extent 20.809,31.26 21.609,32.86
3D body "LED 0603 APT1608 BLUE.STEP": height 0.75, standoff 0, extent 20.809,35.364 21.609,36.964
3D body "LED 0603 APT1608 BLUE.STEP": height 0.75, standoff 0, extent -21.736,5.677 -20.936,7.277
3D body "LED 0603 APT1608 BLUE.STEP": height 0.75, standoff 0, extent -21.735,9.964 -20.935,11.564
3D body "LED 0603 APT1608 BLUE.STEP": height 0.75, standoff 0, extent -21.736,14.282 -20.936,15.882
3D body "LED 0603 APT1608 BLUE.STEP": height 0.75, standoff 0, extent -21.736,18.506 -20.936,20.106
3D body "LED 0603 APT1608 BLUE.STEP": height 0.75, standoff 0, extent -21.736,22.949 -20.936,24.549
3D body "LED 0603 APT1608 BLUE.STEP": height 0.75, standoff 0, extent -21.736,27.267 -20.936,28.867
3D body "LED 0603 APT1608 BLUE.STEP": height 0.75, standoff 0, extent -21.736,31.387 -20.936,32.987
3D body "LED 0603 APT1608 BLUE.STEP": height 0.75, standoff 0, extent -21.736,35.491 -20.936,37.091
3D body "LED 0603 APT1608 BLUE.STEP": height 0.75, standoff 0, extent 13.932,41.002 15.532,41.802
3D body "LED 0603 APT1608 BLUE.STEP": height 0.75, standoff 0, extent 9.645,41.003 11.245,41.803
3D body "LED 0603 APT1608 BLUE.STEP": height 0.75, standoff 0, extent 5.327,41.002 6.927,41.802
3D body "LED 0603 APT1608 BLUE.STEP": height 0.75, standoff 0, extent 1.103,41.002 2.703,41.802
3D body "LED 0603 APT1608 BLUE.STEP": height 0.75, standoff 0, extent -3.34,41.002 -1.74,41.802
3D body "LED 0603 APT1608 BLUE.STEP": height 0.75, standoff 0, extent -7.658,41.002 -6.058,41.802
3D body "LED 0603 APT1608 BLUE.STEP": height 0.75, standoff 0, extent -11.778,41.002 -10.178,41.802
3D body "LED 0603 APT1608 BLUE.STEP": height 0.75, standoff 0, extent -15.882,41.002 -14.282,41.802